# Altium footprint library Francisco_PCB.PcbLib: 51 footprints (part 3 of 4)
Each footprint in its own frame and in the unit in brackets; x right, y up, seen from the top. Pads: shape width x height; smd on the part's side, far side on the other; paste and mask are expansions set on the pad; w line width, h text height; cw(c..) or ccw(c..) is an arc to the next point about the centre after c.
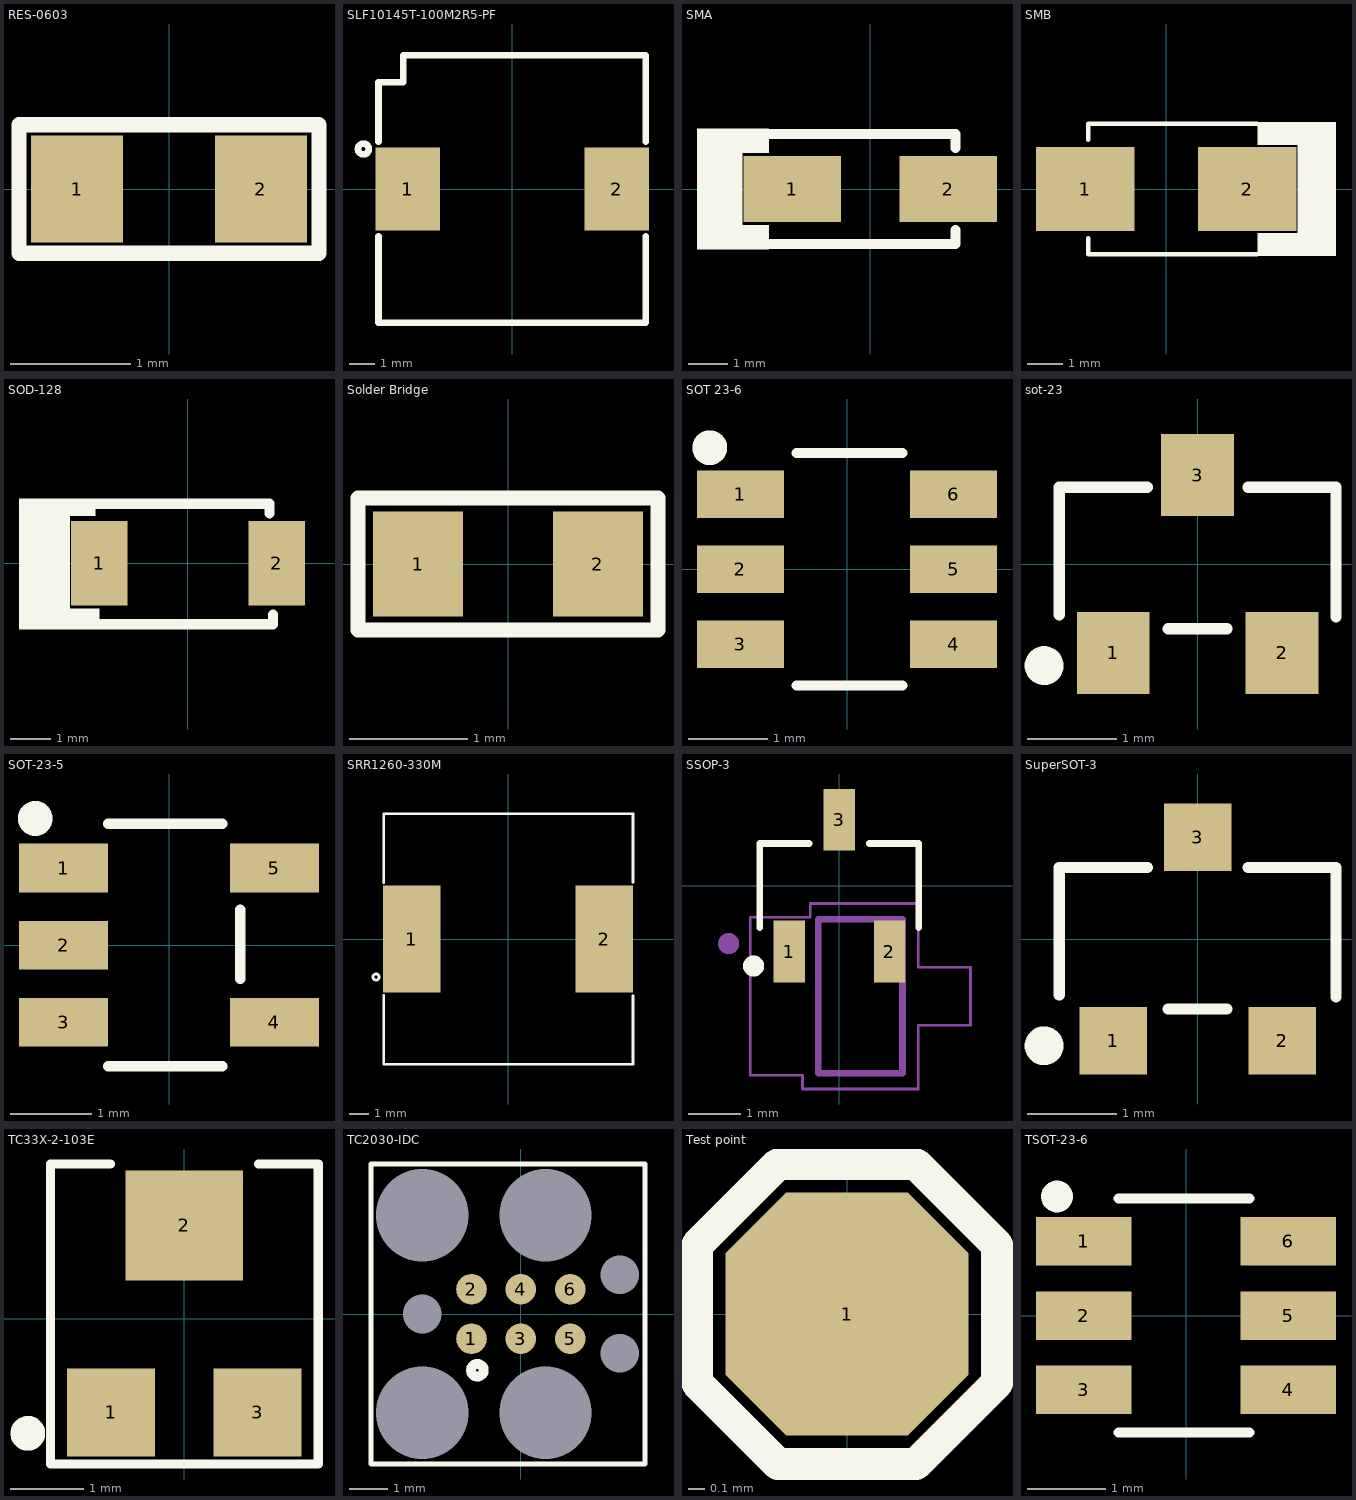
[diagram p2: the footprints below, top view; thin cyan lines are the x and y axes]

## RES-0603 [mil]
pads (2):
  rect 30x35 smd: 1(-30,0) 2(30,0)
Top Overlay:
  lines w5: -49,-21 -49,21 49,21 49,-21 -49,-21
3D body "User Library-RESC1608X05N.step": height 17.76, standoff 0, extent -30.52,-16.74 30.51,16.73

## SLF10145T-100M2R5-PF [mm]
pads (2):
  rect 2.5x3.2 smd: 1(-4.05,0) 2(4.05,0)
Top Overlay:
  circle w0.254: c-5.766,1.549 r0.209
  lines w0.254: -5.182,-1.829 -5.182,-5.182 5.182,-5.182 5.182,-1.829 ; -5.182,1.829 -5.182,4.115 ; -5.182,4.14 -4.216,4.14 -4.216,5.182 5.182,5.182 5.182,1.829
3D body "User Library-SLF10145.STEP": height 4.5, standoff 0, extent -5.06,-5.05 5.06,5.05

## SMA [mm]
pads (2):
  rect 2.5x1.7 smd: 1(-2,0) 2(2,0)
Top Overlay:
  rectangle: -3.3,-1.549 -2.596,-0.924
  rectangle: -3.3,0.924 -2.596,1.549
  rectangle: -4.445,-1.549 -3.278,1.549
  lines w0.254: -2.596,-1.408 2.112,-1.408 ; -2.596,1.408 2.112,1.408 ; 2.188,-1.408 2.188,-1.056 ; 2.188,1.056 2.188,1.408
3D body "User Library-DO-214AC SMA.step": height 2.4, standoff 0, extent -2.6,-1.3 2.6,1.3

## SMB [mm]
pads (2):
  rect 2.8x2.4 smd: 1(-2.3,0) 2(2.3,0)
Top Overlay:
  rectangle: 2.591,-1.905 4.826,-1.245
  rectangle: 3.734,-1.651 4.826,1.346
  rectangle: 2.591,1.245 4.826,1.905
  lines w0.127: -2.21,-1.397 -2.21,-1.854 2.591,-1.854 ; -2.21,1.397 -2.21,1.854 2.591,1.854
3D body "User Library-DO-214AA SMB.step": height 2.3, standoff 0, extent -2.7,-1.8 2.7,1.8

## SOD-128 [mm]
pads (2):
  rect 1.4x2.1 smd: 1(-2.2,0) 2(2.2,0)
Top Overlay:
  rectangle: -4.191,-1.65 -2.926,1.386
  rectangle: -4.191,1.166 -2.288,1.606
  rectangle: -3.608,-1.65 -2.2,-1.122
  lines w0.254: -2.288,1.474 2.024,1.474 2.024,1.232 ; -2.2,-1.518 2.068,-1.518 ; 2.112,-1.518 2.112,-1.276
3D body "PMDTM.stp": height 1.05, standoff 0, extent -2.42,-1.372 2.42,1.328

## Solder Bridge [mil] "Solder Bridge ON"
pads (2):
  rect 30x35 smd: 1(-30,0) 2(30,0)
Top Overlay:
  lines w5: -50,-22 -50,22 50,22 50,-22 -50,-22

## SOT 23-6 [mm]
pads (6):
  rect 1.1x0.6 smd: 1(-1.35,0.95) 2(-1.35,0) 3(-1.35,-0.95) 4(1.35,-0.95) 5(1.35,0) 6(1.35,0.95)
Top Overlay:
  circle w0.254: c-1.738,1.54 r0.093
  lines w0.127: -0.638,-1.474 0.704,-1.474 ; -0.638,1.474 0.704,1.474
3D body "TPS565208DDCT.STEP": height 1.1, standoff 0, extent -1.4,-1.45 1.4,1.45

## sot-23 [mm]
pads (3):
  rect 0.82x0.92 smd: 1(-0.95,-1) 2(0.95,-1) 3(0,1)
Top Overlay:
  circle w0.254: c-1.727,-1.143 r0.092
  lines w0.127: -1.556,-0.572 -1.556,0.864 -0.566,0.864 ; -0.33,-0.728 0.33,-0.728 ; 0.566,0.864 1.556,0.864 1.556,-0.594
3D body "CircuitWorks-SOT-23.step": height 1.1, standoff 0, extent -1.5,-1.25 1.5,1.25

## SOT-23-5 [mm]
pads (5):
  rect 1.1x0.6 smd: 1(-1.3,0.95) 2(-1.3,0) 3(-1.3,-0.95) 4(1.3,-0.95) 5(1.3,0.95)
Top Overlay:
  circle w0.254: c-1.65,1.562 r0.088
  lines w0.127: -0.748,-1.496 0.66,-1.496 ; -0.748,1.496 0.66,1.496 ; 0.88,-0.418 0.88,0.44
3D body "SN74LV1T34DBVR.STEP": height 1.45, standoff 0, extent -1.4,-1.45 1.4,1.45

## SRR1260-330M [mm]
pads (2):
  rect 2.9x5.4 smd: 1(-4.85,0) 2(4.85,0)
Top Overlay:
  circle w0.127: c-6.644,-1.914 r0.156
  lines w0.127: -6.248,-2.838 -6.248,-6.314 6.292,-6.314 6.292,-2.86 ; -6.248,2.838 -6.248,6.314 6.292,6.314 6.292,2.86
3D body "srr1260-330m.stp": height 6, standoff 0, extent -6.25,-6.25 6.25,6.25

## SSOP-3 [mm]
pads (3):
  rect 0.59x1.17 smd: 1(-0.95,-1.25) 2(0.95,-1.25) 3(0,1.25)
Top Overlay:
  circle w0.2: c-1.626,-1.524 r0.1
  lines w0.127: -1.509,-0.8 -1.509,0.8 -0.569,0.8 ; 0.569,0.8 1.509,0.8 1.509,-0.8
Mechanical 13:
  circle w0.2: c-2.098,-1.098 r0.1
  lines w0.127: -0.398,-3.558 1.202,-3.558 1.202,-0.638 -0.398,-0.638 -0.398,-3.558
Mechanical 15:
  lines w0.05: -1.688,-3.598 -0.698,-3.598 -0.698,-3.858 1.502,-3.858 1.502,-2.648 2.492,-2.648 2.492,-1.548 1.502,-1.548 1.502,-0.338 -0.548,-0.338 -0.548,-0.598 -1.688,-0.598 -1.688,-3.598
3D body "SSOP3_ROM.step": height 1.25, standoff 0, extent -1.46,-1.397 1.46,1.397

## SuperSOT-3 [mm]
pads (3):
  rect 0.76x0.76 smd: 1(-0.95,-1.145) 2(0.95,-1.145) 3(0,1.145)
Top Overlay:
  circle w0.254: c-1.727,-1.201 r0.092
  lines w0.127: -1.556,-0.63 -1.556,0.805 -0.566,0.805 ; -0.33,-0.786 0.33,-0.786 ; 0.566,0.805 1.556,0.805 1.556,-0.652
3D body "CircuitWorks-SOT-23.step": height 1.1, standoff 0, extent -1.5,-1.25 1.5,1.25

## TC33X-2-103E [mm]
pads (3):
  rect 1.2x1.2 smd: 1(-1,-1.275) 3(1,-1.275)
  rect 1.6x1.5 smd: 2(0,1.275)
Top Overlay:
  circle w0.254: c-2.134,-1.562 r0.11
  lines w0.127: -1.012,2.112 -1.826,2.112 -1.826,-1.98 1.826,-1.98 1.826,2.112 1.012,2.112
3D body "TC-33X-2.stp": height 1.13, standoff -0.02, extent -1.76,-1.915 1.84,2.047

## TC2030-IDC [mm]
pads (14):
  round 0.787 smd: 1(-1.27,-0.635) 1(-1.27,-0.635) 2(-1.27,0.635) 3(0,-0.635) 4(0,0.635) 5(1.27,-0.635) 6(1.27,0.635)
  round 0 hole 2.375 unplated: MP1(-2.54,-2.54) MP2(0.635,-2.54) MP3(0.635,2.54) MP4(-2.54,2.54)
  round 0 hole 0.991 unplated: MP5(-2.54,0) MP6(2.54,-1.016) MP7(2.54,1.016)
Top Overlay:
  circle w0.254: c-1.118,-1.448 r0.163
  lines w0.127: -3.861,-3.861 3.2,-3.861 3.2,3.861 -3.861,3.861 -3.861,-3.861

## Test point [mil]
pads (1):
  oct 60x60 smd: 1(0,0)
Top Overlay:
  lines w7.87: -17,-37 17,-37 ; -17,-37 -37,-17 -37,17 -17,37 ; -17,-37 17,-37 ; -17,37 17,37 ; -17,37 17,37 ; 17,-37 37,-17 37,17 17,37

## TSOT-23-6 [mm]
pads (6):
  rect 1.22x0.62 smd: 1(-1.31,0.95) 2(-1.31,0) 3(-1.31,-0.95) 4(1.31,-0.95) 5(1.31,0) 6(1.31,0.95)
Top Overlay:
  circle w0.254: c-1.651,1.524 r0.076
  lines w0.127: -0.864,-1.499 0.813,-1.499 ; -0.864,1.499 0.813,1.499
3D body "LTC4412IS6#TRPBF.STEP": height 1, standoff 0, extent -1.4,-1.45 1.4,1.45